# Altium schematic symbol library Isolated_amplifiers.SchLib: 2 symbols
Pins are listed as number, name and electrical type; pins without a type are passive.

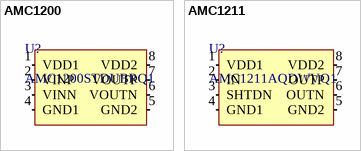
[diagram p0: symbols AMC1200 to AMC1211]

## AMC1200
designator U?, comment AMC1200STDUBRQ1
AMC1200/B Fully-Differential Isolation Amplifier /; Manufacturer: Texas Instruments
footprint SOP254P1040X485-8N (SOP, 8-Leads, Body 9,29x6,62mm, Pitch 2,54mm, IPC Medium Density)
pins: 1 VDD1 (power), 2 VINP (in), 3 VINN (in), 4 GND1 (power), 5 GND2 (power), 6 VOUTN (out), 7 VOUTP (out), 8 VDD2 (power)

## AMC1211
designator U?, comment AMC1211AQDWVQ1
AMC1211-Q1 Automotive, High-Impedance, 2-V Input, Basic Isolated Amplifier; Manufacturer: Texas Instruments
footprint SOIC127P1150X275-8N (SOIC, 8-Leads, Body 5,85x7,50mm, Pitch 1,27mm, IPC Medium Density)
pins: 1 VDD1 (power), 2 IN (in), 3 SHTDN (in), 4 GND1 (power), 5 GND2 (power), 6 OUTN (out), 7 OUTP (out), 8 VDD2 (in)